# Altium schematic symbol library VY2102M29Y5US6TV7.SchLib: 1 symbol
Pins are listed as number, name and electrical type; pins without a type are passive.

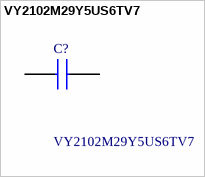
[diagram p0: symbol VY2102M29Y5US6TV7]

## VY2102M29Y5US6TV7
designator C?
Vishay Single Layer Ceramic Capacitor (SLCC) 1nF 300V ac +/-20% Y5U Dielectric, VY2, Through Hole +125C Max Op. Temp.; Geometry.Height: 11.5mm; Mouser Part Number: 72-VY2102M29Y5US6TV7; Mouser Price/Stock: https://www.mouser.co.uk/ProductDetail/Vishay-BC-Components/VY2102M29Y5US6TV7?qs=L4FwfU3379UNAUtS2WN2jw%3D%3D; Manufacturer_Name: Vishay; Manufacturer_Part_Number: VY2102M29Y5US6TV7; Datasheet Link: https://www.vishay.com/docs/28535/vy2series.pdf
footprint VY2102M29Y5US6TV7
pins: 1, 2